# Altium footprint library APE-SBC.PcbLib: 65 footprints (part 4 of 5)
Each footprint in its own frame and in the unit in brackets; x right, y up, seen from the top. Pads: shape width x height; smd on the part's side, far side on the other; paste and mask are expansions set on the pad; w line width, h text height; cw(c..) or ccw(c..) is an arc to the next point about the centre after c.
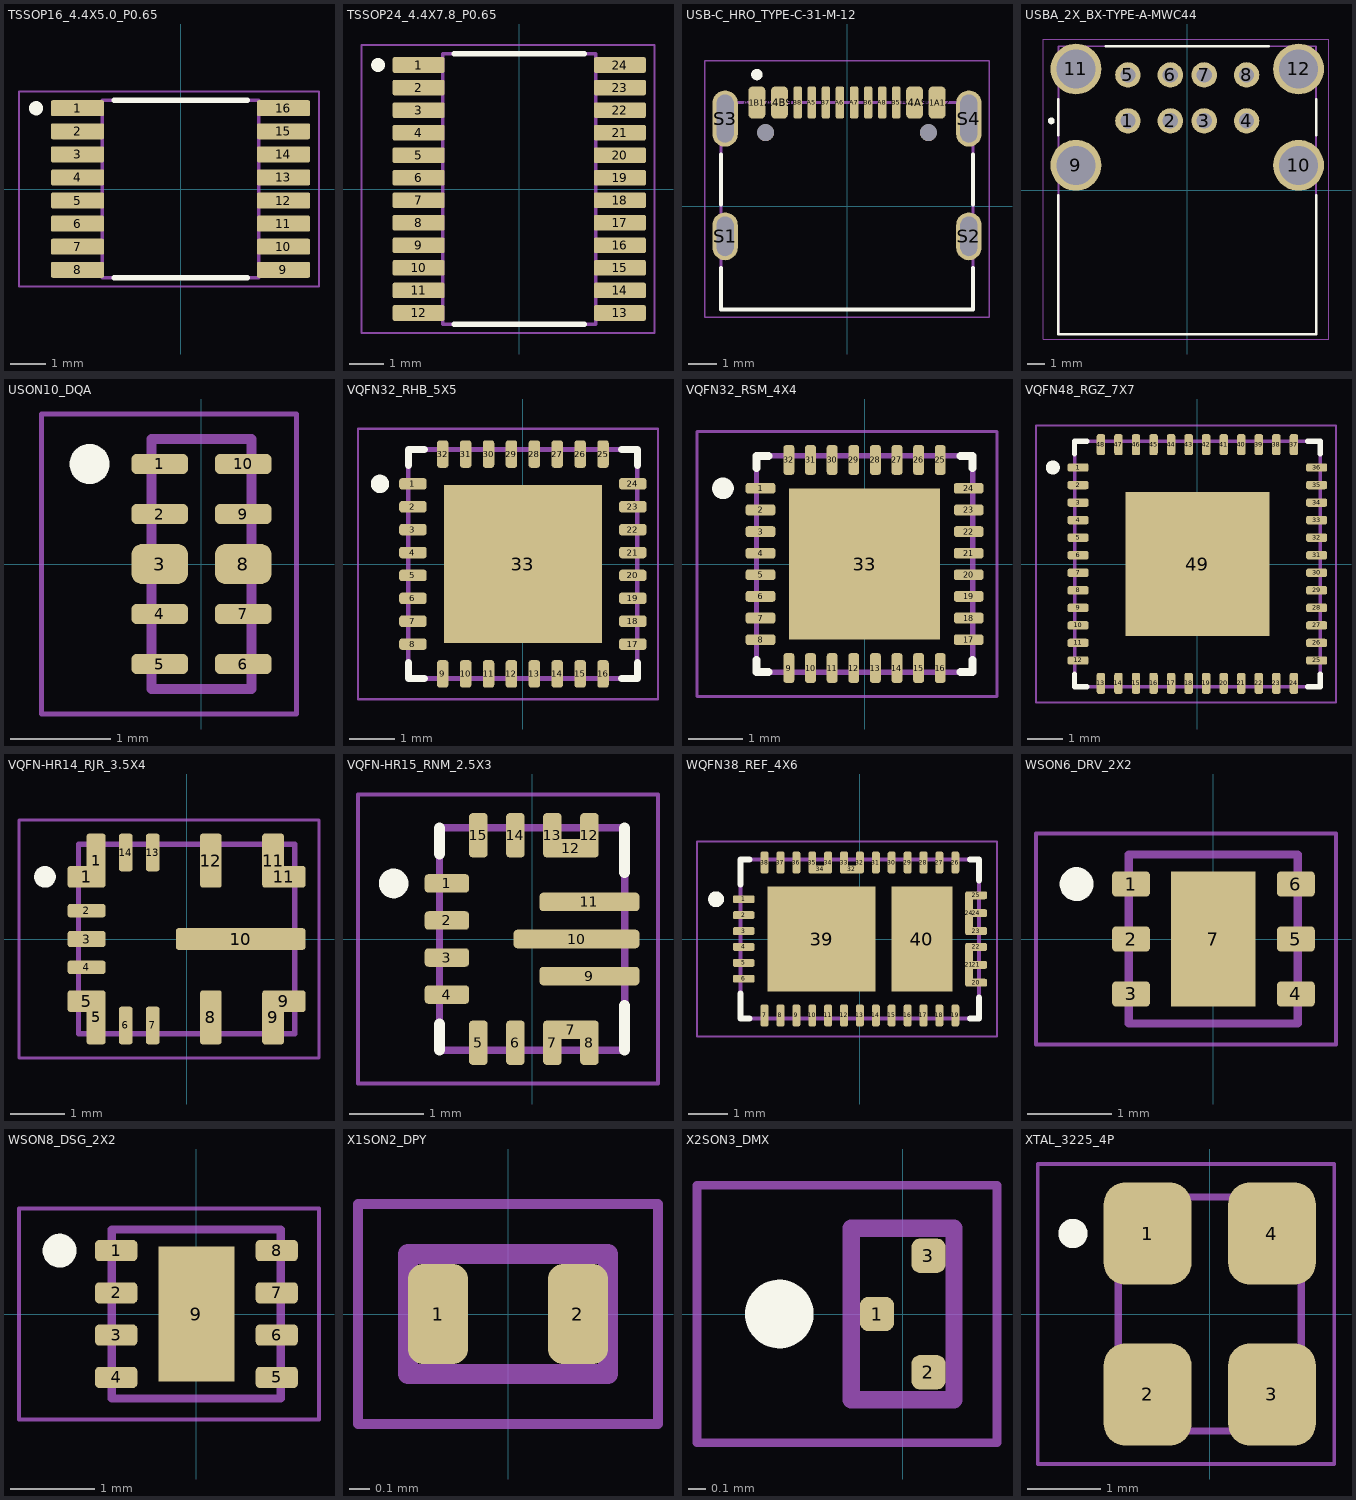
[diagram p3: the footprints below, top view; thin cyan lines are the x and y axes]

## TSSOP16_4.4X5.0_P0.65 [mm] "TSSOP-16 4.4x5.0 mm, 0.65 mm pitch (TI PW0016A), TI example board layout"
pads (16):
  rrect22% 1.5x0.45 smd: 1(-2.9,2.275) 2(-2.9,1.625) 3(-2.9,0.975) 4(-2.9,0.325) 5(-2.9,-0.325) 6(-2.9,-0.975) 7(-2.9,-1.625) 8(-2.9,-2.275) 9(2.9,-2.275) 10(2.9,-1.625) 11(2.9,-0.975) 12(2.9,-0.325) 13(2.9,0.325) 14(2.9,0.975) 15(2.9,1.625) 16(2.9,2.275)
Top Overlay:
  circle w0.2: c-4.07,2.275 r0.1
  lines w0.15: -1.875,-2.5 1.875,-2.5 ; -1.875,2.5 1.875,2.5
Mechanical 13:
  lines w0.1: -2.2,-2.5 -2.2,2.5 2.2,2.5 2.2,-2.5 -2.2,-2.5
Mechanical 15:
  lines w0.05: -4.55,-2.75 -4.55,2.75 3.9,2.75 3.9,-2.75 -4.55,-2.75

## TSSOP24_4.4X7.8_P0.65 [mm] "TSSOP-24 4.4x7.8 mm, 0.65 mm pitch (TI PW0024A), TI example board layout"
pads (24):
  rrect22% 1.5x0.45 smd: 1(-2.9,3.575) 2(-2.9,2.925) 3(-2.9,2.275) 4(-2.9,1.625) 5(-2.9,0.975) 6(-2.9,0.325) 7(-2.9,-0.325) 8(-2.9,-0.975) 9(-2.9,-1.625) 10(-2.9,-2.275) 11(-2.9,-2.925) 12(-2.9,-3.575) 13(2.9,-3.575) 14(2.9,-2.925) 15(2.9,-2.275) 16(2.9,-1.625) 17(2.9,-0.975) 18(2.9,-0.325) 19(2.9,0.325) 20(2.9,0.975) 21(2.9,1.625) 22(2.9,2.275) 23(2.9,2.925) 24(2.9,3.575)
Top Overlay:
  circle w0.2: c-4.07,3.575 r0.1
  lines w0.15: -1.875,-3.9 1.875,-3.9 ; -1.875,3.9 1.875,3.9
Mechanical 13:
  lines w0.1: -2.2,-3.9 2.2,-3.9 2.2,3.9 -2.2,3.9 -2.2,-3.9
Mechanical 15:
  lines w0.05: -4.55,-4.15 3.9,-4.15 3.9,4.15 -4.55,4.15 -4.55,-4.15

## USB-C_HRO_TYPE-C-31-M-12 [mm] "HRO TYPE-C-31-M-12 USB 2.0 Type-C receptacle, SMD + 4 plated shell slots"
pads (18):
  rrect50% 0.6x1.14 smd: A1B12(-3.2,3.675) A4B9(-2.4,3.675) B1A12(3.2,3.675) B4A9(2.4,3.675)
  rrect50% 0.3x1.14 smd: A5(-1.25,3.675) A6(-0.25,3.675) A7(0.25,3.675) A8(1.25,3.675) B5(1.75,3.675) B6(0.75,3.675) B7(-0.75,3.675) B8(-1.75,3.675)
  oval 0.9x1.7 hole 0.6 slot 1.4 at 90 deg: S1(-4.325,-1.075) S2(4.325,-1.075)
  oval 0.9x2 hole 0.6 slot 1.7 at 90 deg: S3(-4.325,3.105) S4(4.325,3.105)
  round 0.6 hole 0.6 unplated: ""(-2.89,2.605) ""(2.89,2.605)
Top Overlay:
  circle w0.2: c-3.2,4.665 r0.1
  lines w0.15: -4.47,-2.2 -4.47,-3.675 4.47,-3.675 4.47,-2.2 ; -4.47,0.05 -4.47,1.83 ; 4.47,0.05 4.47,1.83
Mechanical 13:
  lines w0.1: -4.47,-3.675 4.47,-3.675 4.47,3.675 -4.47,3.675 -4.47,-3.675
Mechanical 15:
  lines w0.05: -5.05,-3.945 5.05,-3.945 5.05,5.155 -5.05,5.155 -5.05,-3.945

## USBA_2X_BX-TYPE-A-MWC44 [mm] "Bossie BX-TYPE-A-MWC44 dual stacked USB 2.0 Type-A receptacle, THT right angle"
pads (12):
  round 1.5 hole 0.9: 1(-3.5,4.09) 2(-1,4.09) 3(1,4.09) 4(3.5,4.09) 5(-3.5,6.8) 6(-1,6.8) 7(1,6.8) 8(3.5,6.8)
  round 3 hole 2.3: 9(-6.57,1.47) 10(6.57,1.47) 11(-6.57,7.15) 12(6.57,7.15)
Top Overlay:
  circle w0.2: c-8.02,4.09 r0.1
  lines w0.15: -7.6,-0.305 -7.6,-8.5 7.6,-8.5 7.6,-0.305 ; -7.6,3.245 -7.6,5.375 ; -4.795,8.5 4.795,8.5 ; 7.6,3.245 7.6,5.375
Mechanical 13:
  lines w0.1: -7.6,-8.5 -7.6,8.5 7.6,8.5 7.6,-8.5 -7.6,-8.5
Mechanical 15:
  lines w0.05: -8.5,-8.78 -8.5,8.92 8.35,8.92 8.35,-8.78 -8.5,-8.78

## USON10_DQA [mm] "USON-10 1x2.5 mm (TI DQA0010A/B), 0.5 mm pitch"
pads (10):
  rrect50% 0.565x0.2 smd: 1(-0.417,1) 2(-0.417,0.5) 4(-0.417,-0.5) 5(-0.417,-1) 6(0.417,-1) 7(0.417,-0.5) 9(0.417,0.5) 10(0.417,1)
  rrect50% 0.565x0.4 smd: 3(-0.417,0) 8(0.417,0)
Top Overlay:
  circle w0.2: c-1.12,1 r0.1
Mechanical 13:
  lines w0.1: -0.5,-1.25 0.5,-1.25 0.5,1.25 -0.5,1.25 -0.5,-1.25
Mechanical 15:
  lines w0.05: -1.6,-1.5 0.95,-1.5 0.95,1.5 -1.6,1.5 -1.6,-1.5

## VQFN32_RHB_5X5 [mm] "TI VQFN-32 (RHB0032E), 5x5 mm, 0.5 mm pitch, 3.45 mm thermal pad (TLV320AIC3104)"
pads (33):
  rrect50% 0.6x0.25 smd: 1(-2.4,1.75) 2(-2.4,1.25) 3(-2.4,0.75) 4(-2.4,0.25) 5(-2.4,-0.25) 6(-2.4,-0.75) 7(-2.4,-1.25) 8(-2.4,-1.75) 17(2.4,-1.75) 18(2.4,-1.25) 19(2.4,-0.75) 20(2.4,-0.25) 21(2.4,0.25) 22(2.4,0.75) 23(2.4,1.25) 24(2.4,1.75)
  rrect50% 0.25x0.6 smd: 9(-1.75,-2.4) 10(-1.25,-2.4) 11(-0.75,-2.4) 12(-0.25,-2.4) 13(0.25,-2.4) 14(0.75,-2.4) 15(1.25,-2.4) 16(1.75,-2.4) 25(1.75,2.4) 26(1.25,2.4) 27(0.75,2.4) 28(0.25,2.4) 29(-0.25,2.4) 30(-0.75,2.4) 31(-1.25,2.4) 32(-1.75,2.4)
  rect 3.45x3.45 smd: 33(0,0)
Top Overlay:
  circle w0.2: c-3.12,1.75 r0.1
  lines w0.15: -2.5,-2.15 -2.5,-2.5 -2.15,-2.5 ; -2.5,2.15 -2.5,2.5 -2.15,2.5 ; 2.15,-2.5 2.5,-2.5 2.5,-2.15 ; 2.15,2.5 2.5,2.5 2.5,2.15
Top Paste:
  rectangle: 0.1,0.1 1.59,1.59
  rectangle: 0.1,-1.59 1.59,-0.1
  rectangle: -1.59,0.1 -0.1,1.59
  rectangle: -1.59,-1.59 -0.1,-0.1
Mechanical 13:
  lines w0.1: -2.5,-2.5 -2.5,2.5 2.5,2.5 2.5,-2.5 -2.5,-2.5
Mechanical 15:
  lines w0.05: -3.6,-2.95 -3.6,2.95 2.95,2.95 2.95,-2.95 -3.6,-2.95

## VQFN32_RSM_4X4 [mm] "TI RSM0032B VQFN-32 4x4 mm, 0.4 mm pitch, 2.8 mm exposed pad (TPS65219)"
pads (33):
  rrect50% 0.55x0.2 smd: 1(-1.925,1.4) 2(-1.925,1) 3(-1.925,0.6) 4(-1.925,0.2) 5(-1.925,-0.2) 6(-1.925,-0.6) 7(-1.925,-1) 8(-1.925,-1.4) 17(1.925,-1.4) 18(1.925,-1) 19(1.925,-0.6) 20(1.925,-0.2) 21(1.925,0.2) 22(1.925,0.6) 23(1.925,1) 24(1.925,1.4)
  rrect50% 0.2x0.55 smd: 9(-1.4,-1.925) 10(-1,-1.925) 11(-0.6,-1.925) 12(-0.2,-1.925) 13(0.2,-1.925) 14(0.6,-1.925) 15(1,-1.925) 16(1.4,-1.925) 25(1.4,1.925) 26(1,1.925) 27(0.6,1.925) 28(0.2,1.925) 29(-0.2,1.925) 30(-0.6,1.925) 31(-1,1.925) 32(-1.4,1.925)
  rect 2.8x2.8 smd: 33(0,0)
Top Overlay:
  circle w0.2: c-2.62,1.4 r0.1
  lines w0.15: -2,-1.775 -2,-2 -1.775,-2 ; -2,1.775 -2,2 -1.775,2 ; 1.775,-2 2,-2 2,-1.775 ; 1.775,2 2,2 2,1.775
Top Paste:
  rectangle: 0.1,0.1 1.33,1.33
  rectangle: 0.1,-1.33 1.33,-0.1
  rectangle: -1.33,0.1 -0.1,1.33
  rectangle: -1.33,-1.33 -0.1,-0.1
Mechanical 13:
  lines w0.1: -2,-2 -2,2 2,2 2,-2 -2,-2
Mechanical 15:
  lines w0.05: -3.1,-2.45 -3.1,2.45 2.45,2.45 2.45,-2.45 -3.1,-2.45

## VQFN48_RGZ_7X7 [mm] "TI VQFN-48 (RGZ0048B), 7x7 mm, 0.5 mm pitch, 4.1 mm thermal pad (DP83867)"
pads (49):
  rrect50% 0.6x0.24 smd: 1(-3.4,2.75) 2(-3.4,2.25) 3(-3.4,1.75) 4(-3.4,1.25) 5(-3.4,0.75) 6(-3.4,0.25) 7(-3.4,-0.25) 8(-3.4,-0.75) 9(-3.4,-1.25) 10(-3.4,-1.75) 11(-3.4,-2.25) 12(-3.4,-2.75) 25(3.4,-2.75) 26(3.4,-2.25) 27(3.4,-1.75) 28(3.4,-1.25) 29(3.4,-0.75) 30(3.4,-0.25) 31(3.4,0.25) 32(3.4,0.75) 33(3.4,1.25) 34(3.4,1.75) 35(3.4,2.25) 36(3.4,2.75)
  rrect50% 0.24x0.6 smd: 13(-2.75,-3.4) 14(-2.25,-3.4) 15(-1.75,-3.4) 16(-1.25,-3.4) 17(-0.75,-3.4) 18(-0.25,-3.4) 19(0.25,-3.4) 20(0.75,-3.4) 21(1.25,-3.4) 22(1.75,-3.4) 23(2.25,-3.4) 24(2.75,-3.4) 37(2.75,3.4) 38(2.25,3.4) 39(1.75,3.4) 40(1.25,3.4) 41(0.75,3.4) 42(0.25,3.4) 43(-0.25,3.4) 44(-0.75,3.4) 45(-1.25,3.4) 46(-1.75,3.4) 47(-2.25,3.4) 48(-2.75,3.4)
  rect 4.1x4.1 smd: 49(0,0)
Top Overlay:
  circle w0.2: c-4.12,2.75 r0.1
  lines w0.15: -3.5,-3.145 -3.5,-3.5 -3.145,-3.5 ; -3.5,3.145 -3.5,3.5 -3.145,3.5 ; 3.145,-3.5 3.5,-3.5 3.5,-3.145 ; 3.145,3.5 3.5,3.5 3.5,3.145
Top Paste:
  rectangle: 0.785,0.785 1.955,1.955
  rectangle: 0.785,-0.585 1.955,0.585
  rectangle: 0.785,-1.955 1.955,-0.785
  rectangle: -0.585,0.785 0.585,1.955
  rectangle: -0.585,-0.585 0.585,0.585
  rectangle: -0.585,-1.955 0.585,-0.785
  rectangle: -1.955,0.785 -0.785,1.955
  rectangle: -1.955,-0.585 -0.785,0.585
  rectangle: -1.955,-1.955 -0.785,-0.785
Mechanical 13:
  lines w0.1: -3.5,-3.5 -3.5,3.5 3.5,3.5 3.5,-3.5 -3.5,-3.5
Mechanical 15:
  lines w0.05: -4.6,-3.95 -4.6,3.95 3.95,3.95 3.95,-3.95 -4.6,-3.95

## VQFN-HR14_RJR_3.5X4 [mm] "TI RJR0014A VQFN-HR-14 4x3.5 mm HotRod, no exposed pad (LM61460)"
pads (18):
  rrect25% 0.7x0.4 smd: 1(-1.85,1.15) 5(-1.85,-1.15)
  rrect29% 0.35x1 smd: 1(-1.675,1.45) 5(-1.675,-1.45)
  rrect40% 0.7x0.25 smd: 2(-1.85,0.525) 4(-1.85,-0.525)
  rrect33% 0.7x0.3 smd: 3(-1.85,0)
  rrect40% 0.25x0.7 smd: 6(-1.125,-1.6) 7(-0.625,-1.6) 13(-0.625,1.6) 14(-1.125,1.6)
  rrect25% 0.4x1 smd: 8(0.45,-1.45) 9(1.6,-1.45) 11(1.6,1.45) 12(0.45,1.45)
  rrect25% 0.8x0.4 smd: 9(1.8,-1.15) 11(1.8,1.15)
  rrect25% 2.4x0.4 smd: 10(1,0)
Top Overlay:
  circle w0.2: c-2.62,1.15 r0.1
Top Paste:
  rectangle: -1.8,0.95 -1.5,1.95
  rectangle: -2.2,0.95 -1.5,1.3
  rectangle: -1.8,-1.95 -1.5,-0.95
  rectangle: -2.2,-1.3 -1.5,-0.95
  rectangle: 1.4,-1.95 1.75,-0.95
  rectangle: 1.4,-1.3 2.2,-0.95
  rectangle: 1.4,0.95 1.75,1.95
  rectangle: 1.4,0.95 2.2,1.3
  rectangle: -0.2,-0.2 0.9,0.2
  rectangle: 1.1,-0.2 2.2,0.2
Mechanical 13:
  lines w0.1: -2,-1.75 2,-1.75 2,1.75 -2,1.75 -2,-1.75
Mechanical 15:
  lines w0.05: -3.1,-2.2 2.45,-2.2 2.45,2.2 -3.1,2.2 -3.1,-2.2

## VQFN-HR15_RNM_2.5X3 [mm] "TI RNM0015A VQFN-HR-15 2.5x3 mm HotRod, no exposed pad (TPS63070)"
pads (17):
  rrect40% 0.6x0.25 smd: 1(-1.15,0.75) 2(-1.15,0.25) 3(-1.15,-0.25) 4(-1.15,-0.75)
  rrect40% 0.25x0.6 smd: 5(-0.725,-1.4) 6(-0.225,-1.4) 7(0.275,-1.4) 8(0.775,-1.4) 12(0.775,1.4) 13(0.275,1.4) 14(-0.225,1.4) 15(-0.725,1.4)
  rrect40% 0.75x0.25 smd: 7(0.525,-1.225) 12(0.525,1.225)
  rrect40% 1.35x0.25 smd: 9(0.775,-0.5) 11(0.775,0.5)
  rrect40% 1.7x0.25 smd: 10(0.6,0)
Top Overlay:
  circle w0.2: c-1.87,0.75 r0.1
  lines w0.15: -1.25,-1.5 -1.25,-1.15 ; -1.25,1.15 -1.25,1.5 ; 1.25,-1.5 1.25,-0.9 ; 1.25,0.9 1.25,1.5
Top Paste:
  rectangle: 0.1,-0.625 0.675,-0.375
  rectangle: 0.875,-0.625 1.45,-0.375
  rectangle: -0.22,-0.125 0.5,0.125
  rectangle: 0.7,-0.125 1.42,0.125
  rectangle: 0.1,0.375 0.675,0.625
  rectangle: 0.875,0.375 1.45,0.625
Mechanical 13:
  lines w0.1: -1.25,-1.5 1.25,-1.5 1.25,1.5 -1.25,1.5 -1.25,-1.5
Mechanical 15:
  lines w0.05: -2.35,-1.95 1.7,-1.95 1.7,1.95 -2.35,1.95 -2.35,-1.95

## WQFN38_REF_4X6 [mm] "TI REF0038A WQFN-38 6x4 mm, 0.4 mm pitch, GND + DRAIN thermal pads (TPS25730D)"
pads (44):
  rrect50% 0.55x0.2 smd: 1(-2.925,1) 2(-2.925,0.6) 3(-2.925,0.2) 4(-2.925,-0.2) 5(-2.925,-0.6) 6(-2.925,-1) 20(2.925,-1.1) 21(2.925,-0.65) 22(2.925,-0.2) 23(2.925,0.2) 24(2.925,0.65) 25(2.925,1.1)
  rrect50% 0.2x0.55 smd: 7(-2.4,-1.925) 8(-2,-1.925) 9(-1.6,-1.925) 10(-1.2,-1.925) 11(-0.8,-1.925) 12(-0.4,-1.925) 13(0,-1.925) 14(0.4,-1.925) 15(0.8,-1.925) 16(1.2,-1.925) 17(1.6,-1.925) 18(2,-1.925) 19(2.4,-1.925) 26(2.4,1.925) 27(2,1.925) 28(1.6,1.925) 29(1.2,1.925) 30(0.8,1.925) 31(0.4,1.925) 32(0,1.925) 33(-0.4,1.925) 34(-0.8,1.925) 35(-1.2,1.925) 36(-1.6,1.925) 37(-2,1.925) 38(-2.4,1.925)
  rrect50% 0.2x1.1 smd: 21(2.75,-0.65) 24(2.75,0.65)
  rrect50% 0.6x0.2 smd: 32(-0.2,1.75) 34(-1,1.75)
  rect 2.72x2.65 smd: 39(-0.965,0)
  rect 1.53x2.65 smd: 40(1.56,0)
Top Overlay:
  circle w0.2: c-3.62,1 r0.1
  lines w0.15: -3,-1.375 -3,-2 -2.775,-2 ; -3,1.375 -3,2 -2.775,2 ; 2.775,-2 3,-2 3,-1.475 ; 2.775,2 3,2 3,1.475
Top Paste:
  rectangle: -2.255,-1.27 -1.065,-0.1
  rectangle: -2.255,0.1 -1.065,1.27
  rectangle: -0.865,-1.27 0.325,-0.1
  rectangle: -0.865,0.1 0.325,1.27
  rectangle: 0.86,-1.27 2.26,-0.1
  rectangle: 0.86,0.1 2.26,1.27
Mechanical 13:
  lines w0.1: -3,-2 3,-2 3,2 -3,2 -3,-2
Mechanical 15:
  lines w0.05: -4.1,-2.45 3.45,-2.45 3.45,2.45 -4.1,2.45 -4.1,-2.45

## WSON6_DRV_2X2 [mm] "TI DRV0006A WSON-6 2x2 mm, 0.65 mm pitch, 1.0x1.6 mm thermal pad (TVS2200)"
pads (7):
  rrect33% 0.45x0.3 smd: 1(-0.975,0.65) 2(-0.975,0) 3(-0.975,-0.65) 4(0.975,-0.65) 5(0.975,0) 6(0.975,0.65)
  rect 1x1.6 smd: 7(0,0)
Top Overlay:
  circle w0.2: c-1.62,0.65 r0.1
Top Paste:
  rectangle: -0.5,-0.8 0.5,-0.1
  rectangle: -0.5,0.1 0.5,0.8
Mechanical 13:
  lines w0.1: -1,-1 1,-1 1,1 -1,1 -1,-1
Mechanical 15:
  lines w0.05: -2.1,-1.25 1.45,-1.25 1.45,1.25 -2.1,1.25 -2.1,-1.25

## WSON8_DSG_2X2 [mm] "TI DSG0008A WSON-8 2x2 mm, 0.5 mm pitch, 0.9x1.6 mm thermal pad (TPS22965)"
pads (9):
  rrect40% 0.5x0.25 smd: 1(-0.95,0.75) 2(-0.95,0.25) 3(-0.95,-0.25) 4(-0.95,-0.75) 5(0.95,-0.75) 6(0.95,-0.25) 7(0.95,0.25) 8(0.95,0.75)
  rect 0.9x1.6 smd: 9(0,0)
Top Overlay:
  circle w0.2: c-1.62,0.75 r0.1
Top Paste:
  rectangle: -0.45,0.1 0.45,0.8
  rectangle: -0.45,-0.8 0.45,-0.1
Mechanical 13:
  lines w0.1: -1,-1 -1,1 1,1 1,-1 -1,-1
Mechanical 15:
  lines w0.05: -2.1,-1.25 -2.1,1.25 1.45,1.25 1.45,-1.25 -2.1,-1.25

## X1SON2_DPY [mm] "X1SON-2 1.0x0.6 mm (TI DPY0002A), bidirectional, 0.3 x 0.5 mm pads"
pads (2):
  rrect50% 0.3x0.5 smd: 1(-0.35,0) 2(0.35,0)
Mechanical 13:
  lines w0.1: -0.5,-0.3 -0.5,0.3 0.5,0.3 0.5,-0.3 -0.5,-0.3
Mechanical 15:
  lines w0.05: -0.75,-0.55 -0.75,0.55 0.75,0.55 0.75,-0.55 -0.75,-0.55

## X2SON3_DMX [mm] "X2SON-3 0.6x1.0 mm (TI DMX0003A), 0.2 mm square pads"
pads (3):
  rrect50% 0.2x0.2 smd: 1(-0.15,0) 2(0.15,-0.34) 3(0.15,0.34)
Top Overlay:
  circle w0.2: c-0.72,0 r0.1
Mechanical 13:
  lines w0.1: -0.3,-0.5 0.3,-0.5 0.3,0.5 -0.3,0.5 -0.3,-0.5
Mechanical 15:
  lines w0.05: -1.2,-0.75 0.55,-0.75 0.55,0.75 -1.2,0.75 -1.2,-0.75

## XTAL_3225_4P [mm] "Crystal 3.2x2.5 mm 4-pad (YXC YSX321SL), 1/3 crystal, 2/4 GND, YXC suggested land"
pads (4):
  rrect50% 1.2x1.4 smd: 1(-0.85,1.1) 2(-0.85,-1.1) 3(0.85,-1.1) 4(0.85,1.1)
Top Overlay:
  circle w0.2: c-1.87,1.1 r0.1
Mechanical 13:
  lines w0.1: -1.25,-1.6 -1.25,1.6 1.25,1.6 1.25,-1.6 -1.25,-1.6
Mechanical 15:
  lines w0.05: -2.35,-2.05 -2.35,2.05 1.7,2.05 1.7,-2.05 -2.35,-2.05